# Altium footprint library TPS3430WDRCR.PcbLib: 2 footprints
Each footprint in its own frame and in the unit in brackets; x right, y up, seen from the top. Pads: shape width x height; smd on the part's side, far side on the other; paste and mask are expansions set on the pad; w line width, h text height; cw(c..) or ccw(c..) is an arc to the next point about the centre after c.
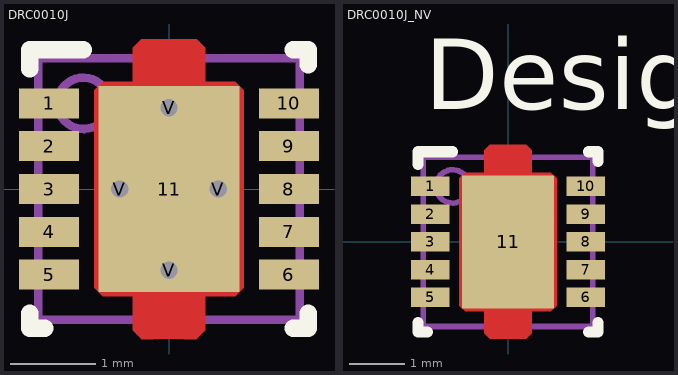
[diagram p0: the footprints below, top view; thin cyan lines are the x and y axes]

## DRC0010J [mm]
pads (15):
  rect 0.7x0.35 smd paste-0.05 mask-0.051: 1(-1.4,1) 2(-1.4,0.5) 3(-1.4,0) 4(-1.4,-0.5) 5(-1.4,-1) 6(1.4,-1) 7(1.4,-0.5) 8(1.4,0) 9(1.4,0.5) 10(1.4,1)
  rect 1.65x2.4 smd paste-1.187 mask-1.181: 11(0,0)
  round 0.5 hole 0.203 paste-2539.97 mask+0: V(-0.575,0) V(0,-0.95) V(0,0.95) V(0.575,0)
Top Layer:
  region: -0.25,1.75 -0.25,1.1 0.25,1.1 0.25,1.75
  region: -0.25,-1.1 -0.25,-1.75 0.25,-1.75 0.25,-1.1
  region: -0.875,-1.15 -0.775,-1.25 -0.425,-1.25 -0.425,-1.65 -0.325,-1.75 -0.175,-1.75 -0.075,-1.65 -0.075,-1.25 0.075,-1.25 0.075,-1.65 0.175,-1.75 0.325,-1.75 0.425,-1.65 0.425,-1.25 0.775,-1.25 0.875,-1.15 0.875,1.15 0.775,1.25 0.425,1.25 0.425,1.65 0.325,1.75 0.175,1.75 0.075,1.65 0.075,1.25 -0.075,1.25 -0.075,1.65 -0.175,1.75 -0.325,1.75 -0.425,1.65 -0.425,1.25 -0.775,1.25 -0.875,1.15
Top Overlay:
  lines w0.2: -1.625,-1.45 -1.625,-1.625 -1.45,-1.625 ; -1.625,1.4 -1.625,1.625 -1,1.625 ; 1.45,-1.625 1.625,-1.625 1.625,-1.45 ; 1.45,1.625 1.625,1.625 1.625,1.45
  text "." at -2.159,1.27 h1.27
Top Paste:
  drawing of 6 lines, arcs and shapes, not listed
Top Solder:
  region: -0.425,-1.2 -0.754,-1.2 -0.825,-1.129 -0.825,1.129 -0.754,1.2 -0.425,1.2 -0.415,1.201 -0.406,1.204 -0.397,1.208 -0.39,1.215 -0.383,1.222 -0.379,1.231 -0.376,1.24 -0.375,1.25 -0.375,1.629 -0.304,1.7 -0.196,1.7 -0.125,1.629 -0.125,1.25 -0.124,1.24 -0.121,1.231 -0.117,1.222 -0.11,1.215 -0.103,1.208 -0.094,1.204 -0.085,1.201 -0.075,1.2 0.075,1.2 0.085,1.201 0.094,1.204 0.103,1.208 0.11,1.215 0.117,1.222 0.121,1.231 0.124,1.24 0.125,1.25 0.125,1.629 0.196,1.7 0.304,1.7 0.375,1.629 0.375,1.25 0.376,1.24 0.379,1.231 0.383,1.222 0.39,1.215 0.397,1.208 0.406,1.204 0.415,1.201 0.425,1.2 0.754,1.2 0.825,1.129 0.825,-1.129 0.754,-1.2 0.425,-1.2 0.415,-1.201 0.406,-1.204 0.397,-1.208 0.39,-1.215 0.383,-1.222 0.379,-1.231 0.376,-1.24 0.375,-1.25 0.375,-1.629 0.304,-1.7 0.196,-1.7 0.125,-1.629 0.125,-1.25 0.124,-1.24 0.121,-1.231 0.117,-1.222 0.11,-1.215 0.103,-1.208 0.094,-1.204 0.085,-1.201 0.075,-1.2 -0.075,-1.2 -0.085,-1.201 -0.094,-1.204 -0.103,-1.208 -0.11,-1.215 -0.117,-1.222 -0.121,-1.231 -0.124,-1.24 -0.125,-1.25 -0.125,-1.629 -0.196,-1.7 -0.304,-1.7 -0.375,-1.629 -0.375,-1.25 -0.376,-1.24 -0.379,-1.231 -0.383,-1.222 -0.39,-1.215 -0.397,-1.208 -0.406,-1.204 -0.415,-1.201
Mechanical 13:
  circle w0.1: c-1,1 r0.3
  lines w0.1: -1.525,-1.525 1.525,-1.525 1.525,1.525 -1.525,1.525 -1.525,-1.525
3D body "DRC0010J.stp": height 1, standoff 0, extent -1.5,-1.5 1.5,1.5

## DRC0010J_NV [mm]
pads (11):
  rect 0.7x0.35 smd paste-0.05 mask-0.051: 1(-1.4,1) 2(-1.4,0.5) 3(-1.4,0) 4(-1.4,-0.5) 5(-1.4,-1) 6(1.4,-1) 7(1.4,-0.5) 8(1.4,0) 9(1.4,0.5) 10(1.4,1)
  rect 1.65x2.4 smd paste-1.187 mask-1.181: 11(0,0)
Top Layer:
  region: -0.25,-1.1 -0.25,-1.75 0.25,-1.75 0.25,-1.1
  region: -0.25,1.75 -0.25,1.1 0.25,1.1 0.25,1.75
  region: -0.875,-1.15 -0.775,-1.25 -0.425,-1.25 -0.425,-1.65 -0.325,-1.75 -0.175,-1.75 -0.075,-1.65 -0.075,-1.25 0.075,-1.25 0.075,-1.65 0.175,-1.75 0.325,-1.75 0.425,-1.65 0.425,-1.25 0.775,-1.25 0.875,-1.15 0.875,1.15 0.775,1.25 0.425,1.25 0.425,1.65 0.325,1.75 0.175,1.75 0.075,1.65 0.075,1.25 -0.075,1.25 -0.075,1.65 -0.175,1.75 -0.325,1.75 -0.425,1.65 -0.425,1.25 -0.775,1.25 -0.875,1.15
Top Overlay:
  lines w0.2: -1.625,-1.45 -1.625,-1.625 -1.45,-1.625 ; -1.625,1.4 -1.625,1.625 -1,1.625 ; 1.45,-1.625 1.625,-1.625 1.625,-1.45 ; 1.45,1.625 1.625,1.625 1.625,1.45
  text "Designator422" at -1.499,2.388 h1.27
  text ".Designator" at -3.492,-0.635 h1.27
Top Paste:
  drawing of 6 lines, arcs and shapes, not listed
Top Solder:
  region: -0.425,-1.2 -0.754,-1.2 -0.825,-1.129 -0.825,1.129 -0.754,1.2 -0.425,1.2 -0.415,1.201 -0.406,1.204 -0.397,1.208 -0.39,1.215 -0.383,1.222 -0.379,1.231 -0.376,1.24 -0.375,1.25 -0.375,1.629 -0.304,1.7 -0.196,1.7 -0.125,1.629 -0.125,1.25 -0.124,1.24 -0.121,1.231 -0.117,1.222 -0.11,1.215 -0.103,1.208 -0.094,1.204 -0.085,1.201 -0.075,1.2 0.075,1.2 0.085,1.201 0.094,1.204 0.103,1.208 0.11,1.215 0.117,1.222 0.121,1.231 0.124,1.24 0.125,1.25 0.125,1.629 0.196,1.7 0.304,1.7 0.375,1.629 0.375,1.25 0.376,1.24 0.379,1.231 0.383,1.222 0.39,1.215 0.397,1.208 0.406,1.204 0.415,1.201 0.425,1.2 0.754,1.2 0.825,1.129 0.825,-1.129 0.754,-1.2 0.425,-1.2 0.415,-1.201 0.406,-1.204 0.397,-1.208 0.39,-1.215 0.383,-1.222 0.379,-1.231 0.376,-1.24 0.375,-1.25 0.375,-1.629 0.304,-1.7 0.196,-1.7 0.125,-1.629 0.125,-1.25 0.124,-1.24 0.121,-1.231 0.117,-1.222 0.11,-1.215 0.103,-1.208 0.094,-1.204 0.085,-1.201 0.075,-1.2 -0.075,-1.2 -0.085,-1.201 -0.094,-1.204 -0.103,-1.208 -0.11,-1.215 -0.117,-1.222 -0.121,-1.231 -0.124,-1.24 -0.125,-1.25 -0.125,-1.629 -0.196,-1.7 -0.304,-1.7 -0.375,-1.629 -0.375,-1.25 -0.376,-1.24 -0.379,-1.231 -0.383,-1.222 -0.39,-1.215 -0.397,-1.208 -0.406,-1.204 -0.415,-1.201
Mechanical 13:
  circle w0.1: c-1,1 r0.3
  lines w0.1: -1.525,-1.525 -1.525,1.525 1.525,1.525 1.525,-1.525 -1.525,-1.525
  text ".Designator" at -3.492,-0.635 h1.27